# EAGLE library part NE555 (library blinky)
Timer
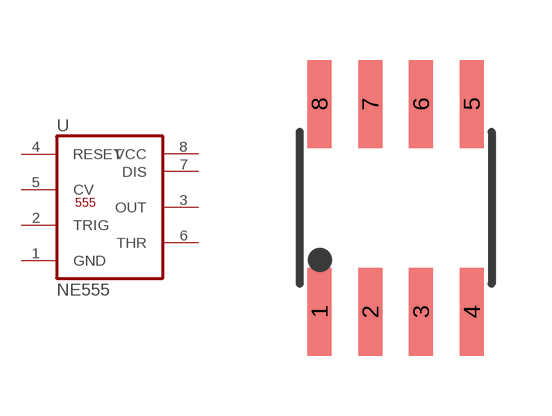
[diagram p0: symbol with the pads of SO08; footprint SO08]

Designator prefix U

## NE555D  [SO08]
1  GND  pwr
2  TRIG  in
3  OUT  out
4  RESET  in
5  CV  in
6  THR  in
7  DIS  oc
8  VCC  pwr

## Footprint SO08 (pad centres in mm)
Synthetic SO08
smd 0.6 x 2.2: 1 -1.905,-2.6; 2 -0.635,-2.6; 3 0.635,-2.6; 4 1.905,-2.6; 5 1.905,2.6; 6 0.635,2.6; 7 -0.635,2.6; 8 -1.905,2.6